# Altium footprint library SOD-123FL.PcbLib: 1 footprints
Each footprint in its own frame and in the unit in brackets; x right, y up, seen from the top. Pads: shape width x height; smd on the part's side, far side on the other; paste and mask are expansions set on the pad; w line width, h text height; cw(c..) or ccw(c..) is an arc to the next point about the centre after c.
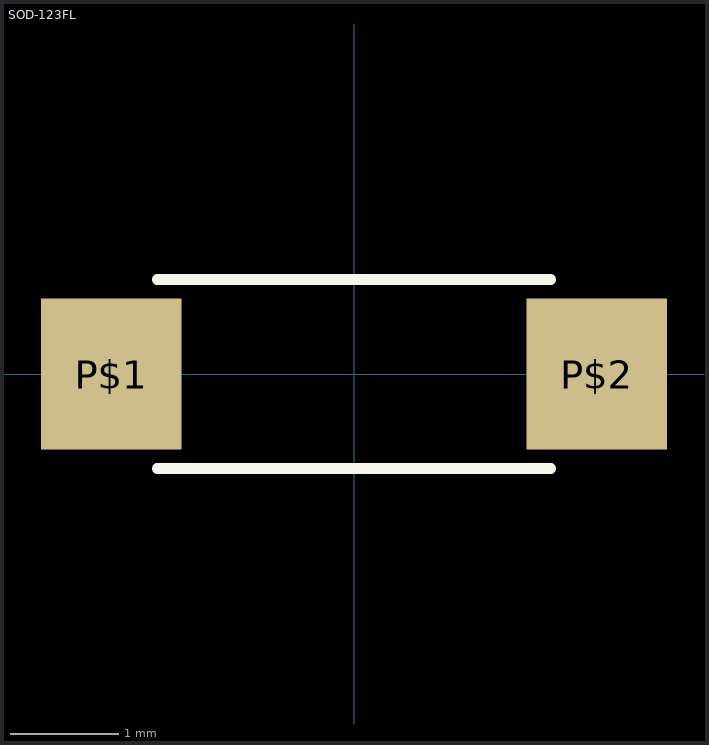
[diagram p0: the footprint, top view; thin cyan lines are the x and y axes]

## SOD-123FL [mm]
pads (2):
  rect 1.3x1.4 smd paste+0 mask+0.102: P$1(-2.25,0) P$2(2.25,0)
Top Overlay:
  lines w0.1: -1.825,-0.875 1.825,-0.875 ; -1.825,0.875 1.825,0.875
3D body "step_temp.STEP": height 1.3, standoff 0, extent -1.85,-0.889 1.85,0.911